# Altium footprint library GSM.PcbLib: 4 footprints
Each footprint in its own frame and in the unit in brackets; x right, y up, seen from the top. Pads: shape width x height; smd on the part's side, far side on the other; paste and mask are expansions set on the pad; w line width, h text height; cw(c..) or ccw(c..) is an arc to the next point about the centre after c.
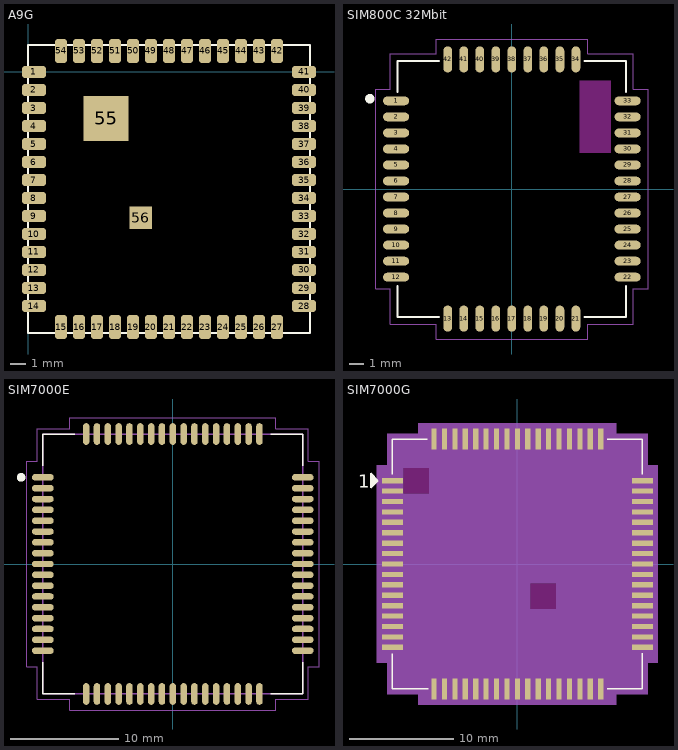
[diagram p0: the footprints below, top view; thin cyan lines are the x and y axes]

## A9G [mm] "A9G"
pads (56):
  rrect50% 1.6x0.8 smd: 1(0.4,0) 2(0.4,-1.2) 3(0.4,-2.4) 4(0.4,-3.6) 5(0.4,-4.8) 6(0.4,-6) 7(0.4,-7.2) 8(0.4,-8.4) 9(0.4,-9.6) 10(0.4,-10.8) 11(0.4,-12) 12(0.4,-13.2) 13(0.4,-14.4) 14(0.4,-15.6) 28(18.4,-15.6) 29(18.4,-14.4) 30(18.4,-13.2) 31(18.4,-12) 32(18.4,-10.8) 33(18.4,-9.6) 34(18.4,-8.4) 35(18.4,-7.2) 36(18.4,-6) 37(18.4,-4.8) 38(18.4,-3.6) 39(18.4,-2.4) 40(18.4,-1.2) 41(18.4,0)
  rrect50% 0.8x1.6 smd: 15(2.2,-17) 16(3.4,-17) 17(4.6,-17) 18(5.8,-17) 19(7,-17) 20(8.2,-17) 21(9.4,-17) 22(10.6,-17) 23(11.8,-17) 24(13,-17) 25(14.2,-17) 26(15.4,-17) 27(16.6,-17) 42(16.6,1.4) 43(15.4,1.4) 44(14.2,1.4) 45(13,1.4) 46(11.8,1.4) 47(10.6,1.4) 48(9.4,1.4) 49(8.2,1.4) 50(7,1.4) 51(5.8,1.4) 52(4.6,1.4) 53(3.4,1.4) 54(2.2,1.4)
  rect 3x3 smd: 55(5.2,-3.1)
  rect 1.5x1.5 smd: 56(7.5,-9.7)
Top Overlay:
  lines w0.127: 0,-17.4 18.8,-17.4 18.8,1.8 0,1.8 0,-17.4
3D body "A9G.STEP": height 1.81, standoff 0, extent -0.002,-17.347 18.798,1.853

## SIM800C 32Mbit [mm] "LCC110P1570X1760X250-42N"
pads (42):
  oval 1.8x0.6 smd: 1(-7.95,6.05) 2(-7.95,4.95) 3(-7.95,3.85) 4(-7.95,2.75) 5(-7.95,1.65) 6(-7.95,0.55) 7(-7.95,-0.55) 8(-7.95,-1.65) 9(-7.95,-2.75) 10(-7.95,-3.85) 11(-7.95,-4.95) 12(-7.95,-6.05) 22(7.95,-6.05) 23(7.95,-4.95) 24(7.95,-3.85) 25(7.95,-2.75) 26(7.95,-1.65) 27(7.95,-0.55) 28(7.95,0.55) 29(7.95,1.65) 30(7.95,2.75) 31(7.95,3.85) 32(7.95,4.95) 33(7.95,6.05)
  oval 0.6x1.8 smd: 13(-4.4,-8.9) 14(-3.3,-8.9) 15(-2.2,-8.9) 16(-1.1,-8.9) 17(0,-8.9) 18(1.1,-8.9) 19(2.2,-8.9) 20(3.3,-8.9) 21(4.4,-8.9) 34(4.4,8.9) 35(3.3,8.9) 36(2.2,8.9) 37(1.1,8.9) 38(0,8.9) 39(-1.1,8.9) 40(-2.2,8.9) 41(-3.3,8.9) 42(-4.4,8.9)
Top Overlay:
  circle w0.381: c-9.75,6.2 r0.127
  lines w0.127: -7.85,-6.65 -7.85,-8.8 -5,-8.8 ; -7.85,6.65 -7.85,8.8 -5,8.8 ; 5,-8.8 7.85,-8.8 7.85,-6.65 ; 5,8.8 7.85,8.8 7.85,6.65
Keep-Out Layer:
  region: 6.8,2.483 4.656,2.483 4.656,7.43 6.8,7.43
Mechanical 15:
  lines w0.05: -9.35,-6.85 -8.35,-6.85 -8.35,-9.3 -5.2,-9.3 -5.2,-10.3 5.2,-10.3 5.2,-9.3 8.35,-9.3 8.35,-6.85 9.35,-6.85 9.35,6.85 8.35,6.85 8.35,9.3 5.2,9.3 5.2,10.3 -5.2,10.3 -5.2,9.3 -8.35,9.3 -8.35,6.85 -9.35,6.85 -9.35,-6.85
3D body "step_temp.STEP": height 2.5, standoff 0, extent -7.85,-8.8 7.85,8.8

## SIM7000E [mm] "SIMCON_SIM7000E"
pads (68):
  oval 2x0.6 smd: 1(-12,8) 2(-12,7) 3(-12,6) 4(-12,5) 5(-12,4) 6(-12,3) 7(-12,2) 8(-12,1) 9(-12,0) 10(-12,-1) 11(-12,-2) 12(-12,-3) 13(-12,-4) 14(-12,-5) 15(-12,-6) 16(-12,-7) 17(-12,-8) 35(12,-8) 36(12,-7) 37(12,-6) 38(12,-5) 39(12,-4) 40(12,-3) 41(12,-2) 42(12,-1) 43(12,0) 44(12,1) 45(12,2) 46(12,3) 47(12,4) 48(12,5) 49(12,6) 50(12,7) 51(12,8)
  oval 0.6x2 smd: 18(-8,-12) 19(-7,-12) 20(-6,-12) 21(-5,-12) 22(-4,-12) 23(-3,-12) 24(-2,-12) 25(-1,-12) 26(0,-12) 27(1,-12) 28(2,-12) 29(3,-12) 30(4,-12) 31(5,-12) 32(6,-12) 33(7,-12) 34(8,-12) 52(8,12) 53(7,12) 54(6,12) 55(5,12) 56(4,12) 57(3,12) 58(2,12) 59(1,12) 60(0,12) 61(-1,12) 62(-2,12) 63(-3,12) 64(-4,12) 65(-5,12) 66(-6,12) 67(-7,12) 68(-8,12)
Top Overlay:
  circle w0.4: c-14,8 r0.2
  lines w0.127: -12,-9.05 -12,-12 -9.05,-12 ; -12,9.05 -12,12 -9.05,12 ; 9.05,-12 12,-12 12,-9.05 ; 9.05,12 12,12 12,9.05
Mechanical 13:
  lines w0.127: -12,-12 -12,12 12,12 12,-12 -12,-12
Mechanical 15:
  lines w0.05: -13.5,-9.5 -13.5,9.5 -12.5,9.5 -12.5,12.5 -9.5,12.5 -9.5,13.5 9.5,13.5 9.5,12.5 12.5,12.5 12.5,9.5 13.5,9.5 13.5,-9.5 12.5,-9.5 12.5,-12.5 9.5,-12.5 9.5,-13.5 -9.5,-13.5 -9.5,-12.5 -12.5,-12.5 -12.5,-9.5 -13.5,-9.5
3D body "SIM7000E--3DModel-STEP-56544.STEP": height 2.8, standoff 0, extent -12,-12 12,12

## SIM7000G [mm]
pads (68):
  rect 2x0.5 smd: 1(-12,8) 2(-12,7) 3(-12,6) 4(-12,5) 5(-12,4) 6(-12,3) 7(-12,2) 8(-12,1) 9(-12,0) 10(-12,-1) 11(-12,-2) 12(-12,-3) 13(-12,-4) 14(-12,-5) 15(-12,-6) 16(-12,-7) 17(-12,-8) 35(12,-8) 36(12,-7) 37(12,-6) 38(12,-5) 39(12,-4) 40(12,-3) 41(12,-2) 42(12,-1) 43(12,0) 44(12,1) 45(12,2) 46(12,3) 47(12,4) 48(12,5) 49(12,6) 50(12,7) 51(12,8)
  rect 0.5x2 smd: 18(-8,-12) 19(-7,-12) 20(-6,-12) 21(-5,-12) 22(-4,-12) 23(-3,-12) 24(-2,-12) 25(-1,-12) 26(0,-12) 27(1,-12) 28(2,-12) 29(3,-12) 30(4,-12) 31(5,-12) 32(6,-12) 33(7,-12) 34(8,-12) 52(8,12) 53(7,12) 54(6,12) 55(5,12) 56(4,12) 57(3,12) 58(2,12) 59(1,12) 60(0,12) 61(-1,12) 62(-2,12) 63(-3,12) 64(-4,12) 65(-5,12) 66(-6,12) 67(-7,12) 68(-8,12)
Top Overlay:
  lines w0.127: -12,-8.636 -12,-12 -8.571,-12 ; -12,8.636 -12,12 -8.636,12 ; 8.636,-12 12,-12 12,-8.571 ; 8.636,12 12,12 12,8.636 ; -14,7.4 -14,8.6 ; -14,7.4 -13.9,7.5 ; -14,7.4 -14.1,7.3 -14.1,8.7 -14,8.6 ; -14,8.6 -13.9,8.5 ; -13.9,7.5 -13.9,8.5 ; -13.9,7.5 -13.8,7.6 ; -13.9,8.5 -13.8,8.4 ; -13.8,7.6 -13.8,8.4 ; -13.8,7.6 -13.7,7.7 ; -13.8,8.4 -13.7,8.3 ; -13.7,7.7 -13.7,8.3 ; -13.7,7.7 -13.6,7.8 ; -13.7,8.3 -13.6,8.2 ; -13.6,7.8 -13.6,8.2 ; -13.6,7.8 -13.5,7.9 ; -13.6,8.2 -13.5,8.1 ; -13.5,7.9 -13.5,8.1 ; -13.5,7.9 -13.4,8 -13.5,8.1
  text "1" at -15.3,7.3 h1.27
Keep-Out Layer:
  region: -8.5,6.8 -10.9,6.8 -10.9,9.2 -8.5,9.2
  region: 3.7,-4.3 1.3,-4.3 1.3,-1.9 3.7,-1.9
Mechanical 15:
  region: 9.5,12.5 12.5,12.5 12.5,9.5 13.5,9.5 13.5,-9.5 12.5,-9.5 12.5,-12.5 9.5,-12.5 9.5,-13.5 -9.5,-13.5 -9.5,-12.5 -12.5,-12.5 -12.5,-9.5 -13.5,-9.5 -13.5,9.5 -12.5,9.5 -12.5,12.5 -9.5,12.5 -9.5,13.5 9.5,13.5 hole: -8.5,9.2 -10.9,9.2 -10.9,6.8 -8.5,6.8 hole: 3.7,-1.9 1.3,-1.9 1.3,-4.3 3.7,-4.3
3D body "SIM7000E--3DModel-STEP-56544.STEP": height 2.8, standoff 0, extent -12,-12 12,12